# Altium footprint library GNSS_PcbLib.PcbLib: 13 footprints
Each footprint in its own frame and in the unit in brackets; x right, y up, seen from the top. Pads: shape width x height; smd on the part's side, far side on the other; paste and mask are expansions set on the pad; w line width, h text height; cw(c..) or ccw(c..) is an arc to the next point about the centre after c.
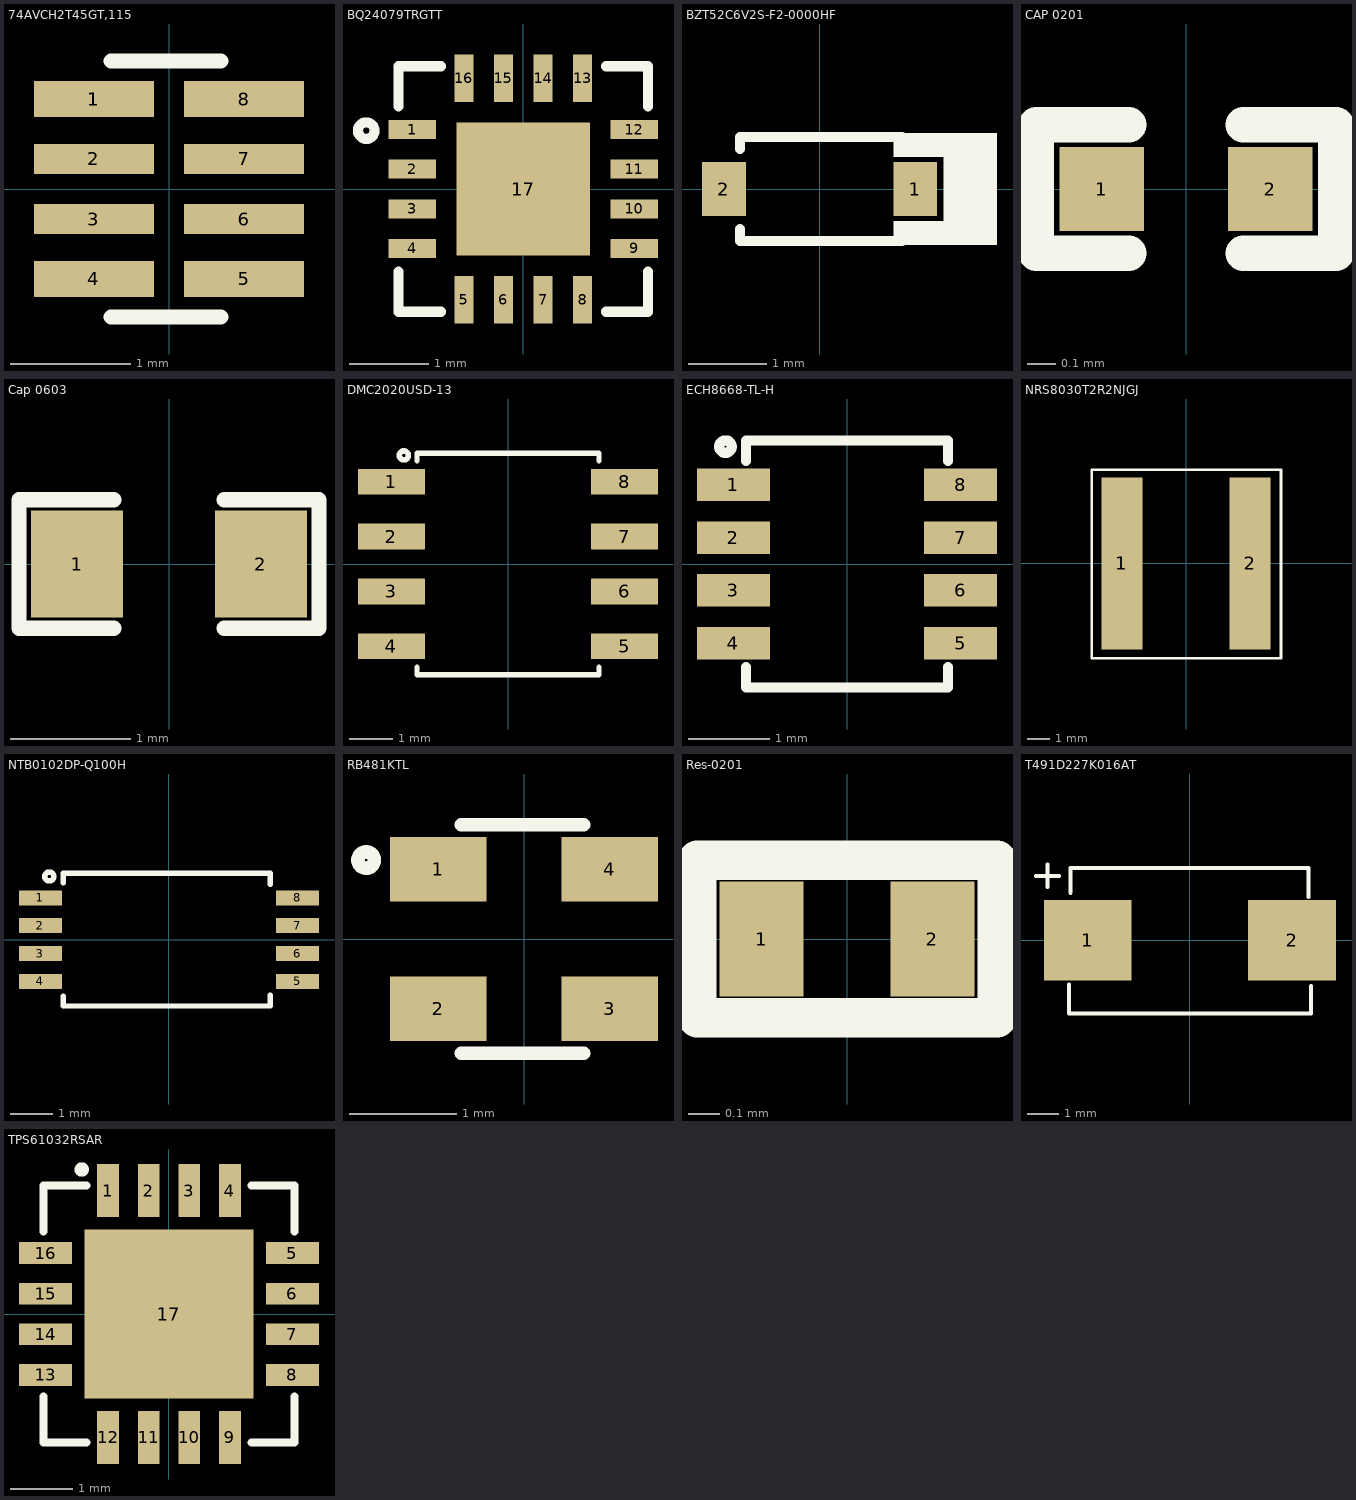
[diagram p0: the footprints below, top view; thin cyan lines are the x and y axes]

## 74AVCH2T45GT,115 [mm]
pads (9):
  rect 1x0.3 smd: 1(-0.625,0.75) 1(-0.625,0.75) 4(-0.625,-0.75) 5(0.625,-0.75) 8(0.625,0.75)
  rect 1x0.25 smd: 2(-0.625,0.25) 3(-0.625,-0.25) 6(0.625,-0.25) 7(0.625,0.25)
Top Overlay:
  lines w0.127: -0.483,-1.067 0.432,-1.067 ; -0.483,1.067 0.432,1.067
3D body "SOT833-1.step": height 0.46, standoff -0.02, extent -0.508,-0.975 0.492,0.975

## BQ24079TRGTT [mm]
pads (17):
  rect 0.6x0.24 smd: 1(-1.4,0.75) 2(-1.4,0.25) 3(-1.4,-0.25) 4(-1.4,-0.75) 9(1.4,-0.75) 10(1.4,-0.25) 11(1.4,0.25) 12(1.4,0.75)
  rect 0.24x0.6 smd: 5(-0.75,-1.4) 6(-0.25,-1.4) 7(0.25,-1.4) 8(0.75,-1.4) 13(0.75,1.4) 14(0.25,1.4) 15(-0.25,1.4) 16(-0.75,1.4)
  rect 1.68x1.68 smd: 17(0,0)
Top Overlay:
  circle w0.127: c-1.981,0.737 r0.105
  lines w0.127: -1.575,-1.041 -1.575,-1.549 -1.041,-1.549 ; -1.575,1.041 -1.575,1.549 -1.041,1.549 ; 1.041,-1.549 1.575,-1.549 1.575,-1.041 ; 1.041,1.549 1.575,1.549 1.575,1.041
3D body "BQ24079TRGTT.STEP": height 1, standoff 0, extent -1.5,-1.5 1.5,1.5

## BZT52C6V2S-F2-0000HF [mil]
pads (2):
  rect 22x27 smd: 1(48,0) 2(-48,0)
Top Overlay:
  rectangle: 37,16 63,28
  region: 65,-16 37,-16 37,-28 65,-28
  region: 89,28 62.28,28 62.28,-28 89,-28
  lines w5: -40,-20 -40,-26 41.28,-26 ; -40,20 -40,26 41.28,26
3D body "User Library-SOD323.step": height 35.43, standoff -3.54, extent -49.21,-25 49.21,24.21

## CAP 0201 [mm]
pads (2):
  rect 0.3x0.3 smd mask+0.055: 1(-0.3,0) 2(0.3,0)
Top Overlay:
  lines w0.127: -0.203,-0.229 -0.533,-0.229 -0.533,0.229 -0.203,0.229 ; 0.203,-0.229 0.533,-0.229 0.533,0.229 0.203,0.229
3D body "User Library-SMD Ceramic Capacitors_0201 (0603)_AB.STEP": height 0.28, standoff -0.02, extent -0.3,-0.15 0.301,0.15

## Cap 0603 [mil]
pads (2):
  rect 30x35 smd mask+2.36: 1(-30,0) 2(30,0)
Top Overlay:
  lines w5: -18,-21 -49,-21 -49,21 -18,21 ; 18,-21 49,-21 49,21 18,21
3D body "User Library-CAPC1608X09.step": height 34.25, standoff -1.18, extent -31.51,-15.75 31.49,15.74

## DMC2020USD-13 [mm]
pads (8):
  rect 1.55x0.6 smd: 1(-2.7,1.905) 2(-2.7,0.635) 3(-2.7,-0.635) 4(-2.7,-1.905) 5(2.7,-1.905) 6(2.7,-0.635) 7(2.7,0.635) 8(2.7,1.905)
Top Overlay:
  circle w0.127: c-2.413,2.515 r0.105
  lines w0.127: -2.108,-2.388 -2.108,-2.565 2.108,-2.565 2.108,-2.388 ; -2.108,2.388 -2.108,2.565 2.108,2.565 2.108,2.388
3D body "SO8_DIO.step": height 1.7, standoff 0, extent -3.099,-2.502 3.099,2.502

## ECH8668-TL-H [mm]
pads (8):
  rect 0.9x0.4 smd: 1(-1.4,0.975) 2(-1.4,0.325) 3(-1.4,-0.325) 4(-1.4,-0.975) 5(1.4,-0.975) 6(1.4,-0.325) 7(1.4,0.325) 8(1.4,0.975)
Top Overlay:
  circle w0.127: c-1.499,1.448 r0.076
  lines w0.127: -1.245,-1.27 -1.245,-1.524 1.245,-1.524 1.245,-1.27 ; -1.245,1.27 -1.245,1.524 1.245,1.524 1.245,1.27
3D body "ECH8_2P3X2P9_ONS.step": height 0.89, standoff 0, extent -1.4,-1.448 1.4,1.448

## NRS8030T2R2NJGJ [mm] "FIXED IND 2.2UH 4.8A 19.5MOHM SM"
pads (2):
  rect 1.8x7.5 smd: 1(-2.8,0) 2(2.8,0)
Top Overlay:
  lines w0.127: -4.115,-4.14 -4.115,4.089 4.14,4.089 4.14,-4.14 -4.115,-4.14
3D body "IND_TAIYO_NRS8030_TAY.step": height 3, standoff 0, extent -4.102,-4.13 4.102,4.08

## NTB0102DP-Q100H [mm]
pads (8):
  rect 1x0.35 smd: 1(-3,0.975) 2(-3,0.325) 3(-3,-0.325) 4(-3,-0.975) 5(3,-0.975) 6(3,-0.325) 7(3,0.325) 8(3,0.975)
Top Overlay:
  circle w0.127: c-2.794,1.473 r0.105
  lines w0.127: -2.464,-1.321 -2.464,-1.549 2.362,-1.549 ; -2.464,1.321 -2.464,1.549 2.362,1.549 ; 2.362,-1.524 2.362,-1.295 ; 2.362,1.295 2.362,1.524
3D body "User Library-TSSOP-8.STEP": height 1.2, standoff 0, extent -3.2,-1.5 3.2,1.5

## RB481KTL [mm]
pads (4):
  rect 0.9x0.6 smd: 1(-0.8,0.65) 2(-0.8,-0.65) 3(0.8,-0.65) 4(0.8,0.65)
Top Overlay:
  circle w0.127: c-1.473,0.737 r0.076
  lines w0.127: -0.584,-1.067 0.559,-1.067 ; -0.584,1.067 0.559,1.067
3D body "DIO_RB480_ROM.step": height 0.99, standoff 0, extent -1.105,-1.003 1.105,1.003

## Res-0201 [mm]
pads (2):
  rect 0.27x0.37 smd: 1(-0.275,0) 2(0.275,0)
Top Overlay:
  lines w0.127: -0.483,-0.254 0.483,-0.254 0.483,0.254 -0.483,0.254 -0.483,-0.254
3D body "User Library-0201(0603M) Res.step": height 0.29, standoff -0.02, extent -0.305,-0.152 0.305,0.153

## T491D227K016AT [mm] "CAP TANT 220UF 10% 16V 2917"
pads (2):
  rect 2.77x2.55 smd: 1(-3.22,0) 2(3.22,0)
Top Overlay:
  lines w0.127: -4.851,2.032 -4.128,2.032 ; -4.484,1.682 -4.484,2.393 ; -3.81,-1.397 -3.81,-2.311 3.81,-2.311 3.81,-1.442 ; -3.761,1.499 -3.761,2.286 3.734,2.286 3.734,1.364
3D body "CTSM_TCM2NK_7343_L7.6W4.6H3.1T0.13S1.3F2.5A3.6B0.65E3.5G3.5P0.9R1X0.2.step": height 3.11, standoff 0, extent -3.8,-2.286 3.8,2.314

## TPS61032RSAR [mm]
pads (17):
  rect 0.35x0.85 smd: 1(-0.975,1.975) 2(-0.325,1.975) 3(0.325,1.975) 4(0.975,1.975) 9(0.975,-1.975) 10(0.325,-1.975) 11(-0.325,-1.975) 12(-0.975,-1.975)
  rect 0.85x0.35 smd: 5(1.975,0.975) 6(1.975,0.325) 7(1.975,-0.325) 8(1.975,-0.975) 13(-1.975,-0.975) 14(-1.975,-0.325) 15(-1.975,0.325) 16(-1.975,0.975)
  rect 2.7x2.7 smd: 17(0,0)
Top Overlay:
  circle w0.127: c-1.397,2.311 r0.051
  lines w0.127: -2.007,-1.321 -2.007,-2.057 -1.321,-2.057 ; -2.007,1.321 -2.007,2.057 -1.321,2.057 ; 1.321,-2.057 2.007,-2.057 2.007,-1.321 ; 1.321,2.057 2.007,2.057 2.007,1.321
3D body "TPS61032RSAR.STEP": height 1, standoff 0, extent -2,-2 2,2